# Altium schematic symbol library Relay.SchLib: 49 symbols
Pins are listed as number, name and electrical type; pins without a type are passive.

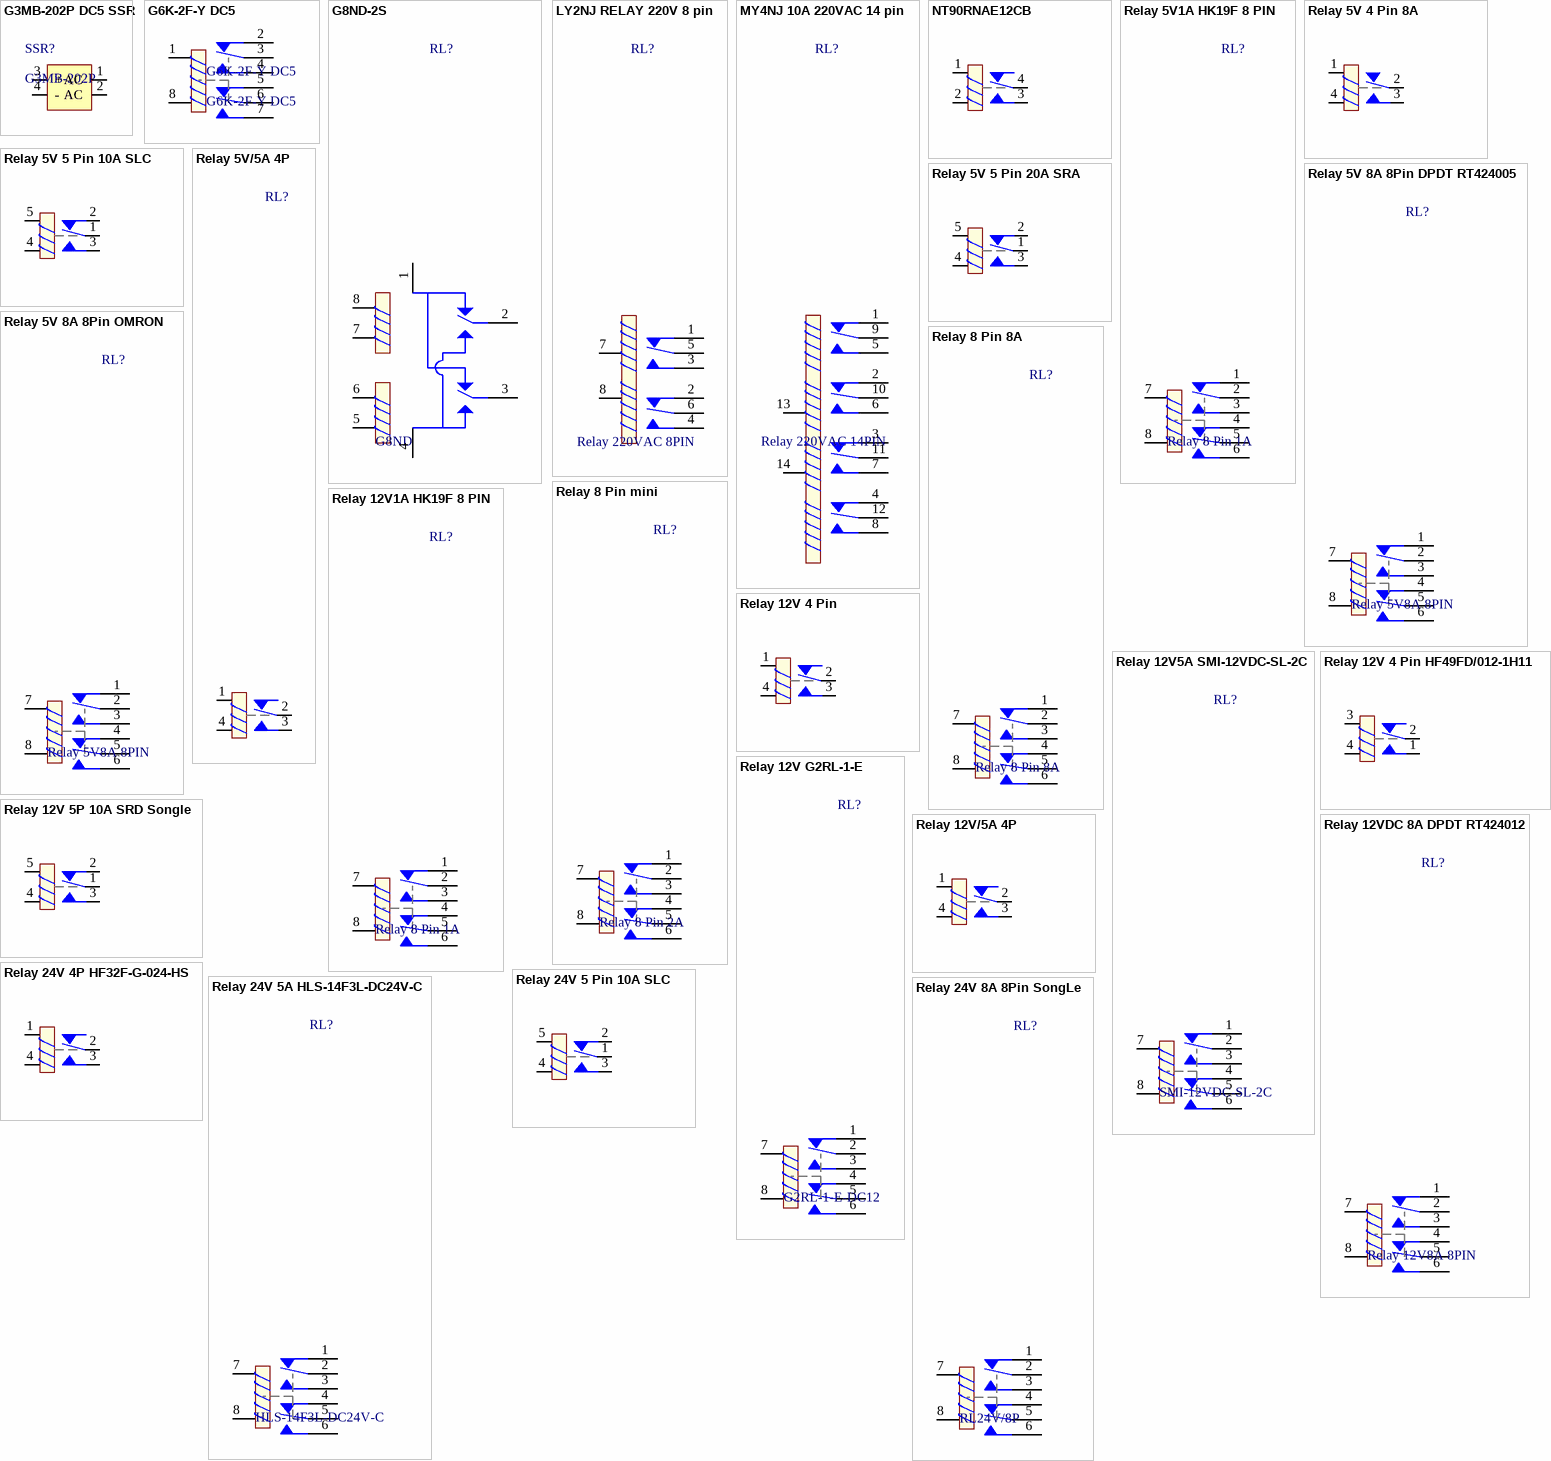
[diagram p0: symbols G3MB-202P DC5 SSR to Relay 24V 8A 8Pin SongLe]

## G3MB-202P DC5 SSR
designator SSR?, comment G3MB-202P
2 A at 100 to 240 VAC,  5 VDC, Zero / cross; Designed by: Nhox; Code: N/A
footprint G3MB (24.5x20.5x5.5mm)
pins: 1 AC, 2 AC, 3 +, 4 -

## G6K-2F-Y DC5
designator G6K-2F-Y DC5
G6K-2F-Y DC5 Omron Relay 1A 5V 8 Pin
footprint G6K-2F-Y (G6K-2F-Y DC5 Omron Relay 1A 5V 8 PIN)
pins: 1, 2, 3, 4, 5, 6, 7, 8

## G8ND-2S
designator RL?, comment G8ND
Automotive PCB relay (Dual H-Bridge); Code: N/A
footprint G8ND-2S
pins: 1, 2, 3, 4, 5, 6, 7, 8

## LY2NJ RELAY 220V 8 pin
designator RL?, comment Relay 220VAC 8PIN
Code: 2409-020; Code_sub1: N/A
footprint 13F-2Z-A2
pins: 1, 2, 3, 4, 5, 6, 7 13, 8 14

## MY4NJ 10A 220VAC 14 pin
designator RL?, comment Relay 220VAC 14PIN
Code: 2409-023; Code_sub1: 4301-062
footprint PY14-02
pins: 1, 2, 3, 4, 5, 6, 7, 8, 9, 10, 11, 12, 13, 14

## NT90RNAE12CB
designator RL?, comment 12V/40A
Relay NT90 40A; Code: 2403-232
footprint Relay BIG 4 Pin
pins: 1, 2, 3, 4

## Relay 5V1A HK19F 8 PIN
designator RL?, comment Relay 8 Pin 1A
Relay 5V1A HK19F-DC05V-SHG 8 Pin; Code: 2401-017
footprint Relay 8PIN mini (Reley DPDT, 8 pin, 1A, W400mil, L800mil,H 300mil)
pins: 1, 2, 3, 4, 5, 6, 7, 8

## Relay 5V 4 Pin 8A
designator RL?, comment Relay 10A/5V
Relay SPDT,8 A - 5VDC 4 Pin; Code: 2401-002
footprint RELAY 4PIN
pins: 1, 2, 3, 4

## Relay 5V 5 Pin 10A SLC
designator RL?, comment Relay 10A/5V
Relay SPDT,10A - 5VDC 5 Pin SONGLE SLC; Code: 2401-001
footprint Relay 5 pin 10A (Relay SPDT, 5 pin, 10A,W 650mil, L 800mil, H 800mil)
pins: 1, 2, 3, 4, 5

## Relay 5V 5 Pin 20A SRA
designator RL?, comment Relay 20A/5V
Relay SPDT,20A - 5VDC 5 Pin SONGLE SRA; Code: 2401-001
footprint Relay 5 pin SRA AL (Relay SPDT, 5 pin, 10A,W 12.4mm, L 16mm, H 14.2mm)
pins: 1, 2, 3, 4, 5

## Relay 5V 8A 8Pin DPDT RT424005
designator RL?, comment Relay 5V8A 8PIN
Relay 5VDC 8A DPDT RT424005; Code: 2401-023
footprint Relay 8P RT424005 (Reley DPDT, 8 pin, 8A, W500mil, L1100mil,H 950mil)
pins: 1, 2, 3, 4, 5, 6, 7, 8

## Relay 5V 8A 8Pin OMRON
designator RL?, comment Relay 5V8A 8PIN
Relay 5VDC 8A; Designed: TranLuyen; Code: N/A; ComponentLink1Description: Datasheet; ComponentLink1URL: https://omronfs.omron.com/en_US/ecb/products/pdf/en-g2rl.pdf
footprint Relay 8pin OMRON (Reley DPDT, 8P)
pins: 1, 2, 3, 4, 5, 6, 7, 8

## Relay 5V/5A 4P
designator RL?, comment Relay 5V/5A  (value not drawn)
G5NB-1A-E-5VDC Relay 5VDC 5A SPST-NO; Code: 2401-004; Designed by: TranLuyen
footprint Relay G5NB-1A-E
pins: 1, 2, 3, 4

## Relay 8 Pin 8A
designator RL?
Relay DPDT; Discription: Relay DPDT 5V, 12V - 1A - 5A; Value: Relay - 5V - 1A
footprint Relay 8pin (Reley DPDT, 8 pin, 5A, W500mil, L1100mil,H 950mil)
pins: 1, 2, 3, 4, 5, 6, 7, 8

## Relay 8 Pin mini
designator RL?, comment Relay 8 Pin 2A
Relay HK19F 5V/12V; Discription: Relay DPDT 5V, 12V - 1A - 5A; Value: Relay - 5V - 1A
footprint Relay 8PIN mini (Reley DPDT, 8 pin, 1A, W400mil, L800mil,H 300mil)
pins: 1, 2, 3, 4, 5, 6, 7, 8

## Relay 12V1A HK19F 8 PIN
designator RL?, comment Relay 8 Pin 1A
Relay 12V1A HK19F-DC12V-SHG 8 Pin; Code: 2403-210
footprint Relay 8PIN mini (Reley DPDT, 8 pin, 1A, W400mil, L800mil,H 300mil)
pins: 1, 2, 3, 4, 5, 6, 7, 8

## Relay 12V5A SMI-12VDC-SL-2C
designator RL?, comment SMI-12VDC-SL-2C
Code: 2403-135
footprint Relay 8pin OMRON (Reley DPDT, 8P 12.7*15.7*29)
pins: 1, 2, 3, 4, 5, 6, 7, 8

## Relay 12V 4 Pin
designator RL?, comment Relay 10A/12V
Relay SPDT JZC-32F/012-HS3; Code: 2403-011
footprint RELAY 4PIN
pins: 1, 2, 3, 4

## Relay 12V 4 Pin HF49FD/012-1H11
designator RL?, comment Relay 5A/12V
Relay SPDT HF49FD/012-1H11; Code: 2403-028
footprint Relay 12V5A HF49FD/012-1H11 (12x20x5mm)
footprint Relay 12V5A HF49FD/012-1H11_2_FD (12x20x5mm)
pins: 1, 2, 3, 4

## Relay 12V 5P 10A SRD Songle
designator RL?, comment Relay 10A/12V
Relay SPDT,10A - 12VDC 5 Pin SONGLE SRD; Code: 2403-017
footprint Relay SONGLE SRD 12V (Relay SPDT, 5 pin, 10A,W 650mil, L 800mil, H 800mil)
pins: 1, 2, 3, 4, 5

## Relay 12V G2RL-1-E
designator RL?, comment G2RL-1-E-DC12
G2RL PCB Power Relay; Code: 2403-225; ComponentLink1Description: Datasheet; ComponentLink1URL: https://omronfs.omron.com/en_US/ecb/products/pdf/en-g2rl.pdf
footprint Relay 8pin OMRON (Reley DPDT, 8P 12.7*15.7*29)
pins: 1, 2, 3, 4, 5, 6, 7, 8

## Relay 12V/5A 4P
designator RL?, comment Relay 12V/5A
G5NB-1A-E-12VDC, 5A SPST-NO; Code: 2403-012; Designed by: TranLuyen
footprint Relay G5NB-1A-E
pins: 1, 2, 3, 4

## Relay 12VDC 8A DPDT RT424012
designator RL?, comment Relay 12V8A 8PIN
Relay 12VDC 8A DPDT RT424012; Code: 2403-211
footprint Relay 8P RT424005 (Reley DPDT, 8 pin, 8A, W500mil, L1100mil,H 950mil)
pins: 1, 2, 3, 4, 5, 6, 7, 8

## Relay 24V 4P HF32F-G-024-HS
designator RL?, comment HF32F-G-024
Relay SPDT HF32F-G 10A; Code: 2404-009; Designed by: TranLuyen
footprint RELAY 4PIN - black
pins: 1, 2, 3, 4

## Relay 24V 5 Pin 10A SLC
designator RL?, comment Relay 10A/24V
Relay SPDT,10A - 24VDC 5 Pin SONGLE SLC; Code: 2404-012
footprint Relay 5 pin 10A (Relay SPDT, 5 pin, 10A,W 650mil, L 800mil, H 800mil)
pins: 1, 2, 3, 4, 5

## Relay 24V 5A HLS-14F3L-DC24V-C
designator RL?, comment HLS-14F3L-DC24V-C
Relay 24V 5A HLS-14F3L-DC24V-C; Code: N/A
footprint HLS-14F3L-DC24V-C
pins: 1, 2, 3, 4, 5, 6, 7, 8

## Relay 24V 8A 8Pin SongLe
designator RL?, comment RL24V/8P
Relay 8P; Designed: TranLuyen; Code: N/A
footprint Relay 8pin OMRON (Reley DPDT, 8P)
pins: 1, 2, 3, 4, 5, 6, 7, 8

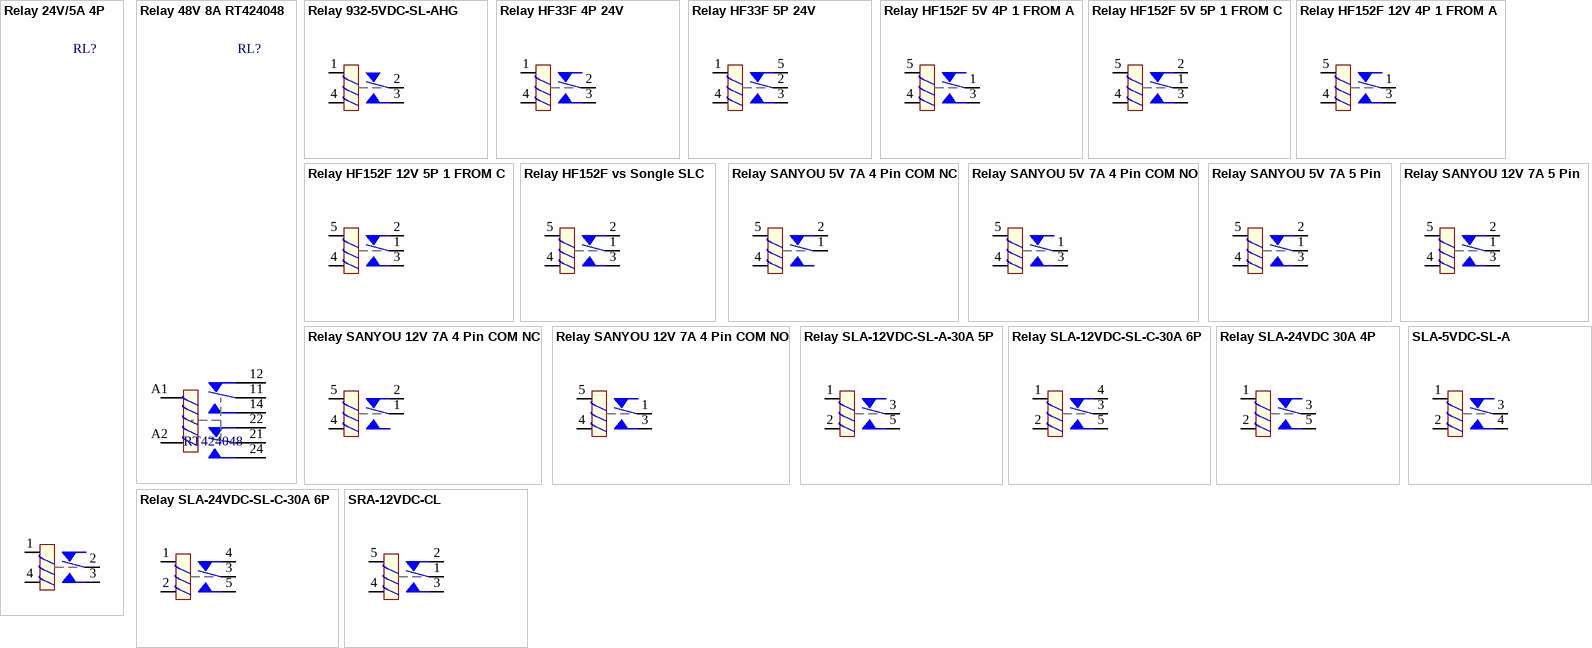
[diagram p1: symbols Relay 24V/5A 4P to SRA-12VDC-CL]

## Relay 24V/5A 4P
designator RL?, comment Relay 24V/5A  (value not drawn)
G5NB-1A-E-24VDC Relay  24VDC 5A SPST-NO; Designed by: TranLuyen; Code: N/A
footprint Relay G5NB-1A-E
pins: 1, 2, 3, 4

## Relay 48V 8A RT424048
designator RL?, comment RT424048
Relay 48V 8A RT424048; Code: N/A
footprint Relay RT2
pins: 11, 12, 14, 21, 22, 24, A1, A2

## Relay 932-5VDC-SL-AHG
designator RL?, comment RL-5V/16A
Relay NHC HUILONGCANG 932 Series; Designed by: TranLuyen; Code: N/A; ComponentLink1Description: Datasheets; ComponentLink1URL: https://github.com/TranLuyen-dev/Datasheets/blob/7f56fa0321b63c60dea403a14b0107a2237805bf/Relay/932-5VDC-SL-AHG_C396980.pdf
footprint RELAY 4PIN - black
pins: 1, 2, 3, 4

## Relay HF33F 4P 24V
designator RL?, comment Relay 10A/24V
Relay HONGFA 33F 24VDC; Code: 2404-164
footprint RELAY HF33F 4pin
pins: 1, 2, 3, 4

## Relay HF33F 5P 24V
designator RL?, comment Relay 10A/24V
Relay HONGFA 33F 24VDC; Code: 2404-164
footprint RELAY HF33F 5pin
pins: 1, 2, 3, 4, 5

## Relay HF152F 5V 4P 1 FROM A
designator RL?, comment Relay 20A/5V
Relay HF152F 5V 4P FROM A; Code: 2401-025-2; ComponentLink1Description: Datasheet; ComponentLink1URL: https://panda-bg.com/datasheet/2796-270716-Relay-HF152F.pdf
footprint Relay HF152F-1 Form A 4P (Relay HF152F-T W16 L21 H20.6)
pins: 1, 3, 4, 5

## Relay HF152F 5V 5P 1 FROM C
designator RL?, comment Relay 20A/5V
Relay HF152F 5V 4P FROM C; Code: 2401-025; ComponentLink1Description: Datasheet; ComponentLink1URL: https://panda-bg.com/datasheet/2796-270716-Relay-HF152F.pdf
footprint Relay HF152F-1 Form C 5P (Relay HF152F-T W16 L21 H20.6)
pins: 1, 2, 3, 4, 5

## Relay HF152F 12V 4P 1 FROM A
designator RL?, comment Relay 20A/12V
Relay HF152F 12V 4P FROM A; Code: 2403-219; ComponentLink1Description: Datasheet; ComponentLink1URL: https://panda-bg.com/datasheet/2796-270716-Relay-HF152F.pdf
footprint Relay HF152F-1 Form A 4P (Relay HF152F-T W16 L21 H20.6)
pins: 1, 3, 4, 5

## Relay HF152F 12V 5P 1 FROM C
designator RL?, comment Relay 20A/12V
Relay HF152F 12V 5P FROM C; Code: 2403-218; ComponentLink1Description: Datasheet; ComponentLink1URL: https://panda-bg.com/datasheet/2796-270716-Relay-HF152F.pdf
footprint Relay HF152F-1 Form C 5P (Relay HF152F-T W16 L21 H20.6)
pins: 1, 2, 3, 4, 5

## Relay HF152F vs Songle SLC
designator RL?, comment Relay 5V 5P
Relay HF152F 5V 5P vs Relay Songle 5V 5P SLC; Designed by: TranLuyen; Code: N/A
footprint Relay HF152F vs Songle SLC (Relay HF152F-T W16 L21 H20.6)
pins: 1, 2, 3, 4, 5

## Relay SANYOU 5V 7A 4 Pin COM NC
designator RL?, comment Relay 7A/5V
Relay SANYOU 5V 7A 1B; Code: N/A
footprint Relay Sanyou 4P 1B (SANYOU 4 Pin 1B)
pins: 1, 2, 4, 5

## Relay SANYOU 5V 7A 4 Pin COM NO
designator RL?, comment Relay 7A/5V
Relay SANYOU 5V 7A 1A; Code: 2401-030-1
footprint Relay Sanyou 4P 1A (SANYOU 4 Pin 1A)
pins: 1, 3, 4, 5

## Relay SANYOU 5V 7A 5 Pin
designator RL?, comment Relay 7A/5V
Relay SANYOU 5V 7A 1C; Code: 2401-030
footprint Relay Sanyou 5P 1C (SANYOU 5 Pin 1C)
pins: 1, 2, 3, 4, 5

## Relay SANYOU 12V 7A 4 Pin COM NC
designator RL?, comment Relay 7A/12V
Relay SANYOU 12V 7A 1B; Code: N/A
footprint Relay Sanyou 4P 1B (SANYOU 4 Pin 1B)
pins: 1, 2, 4, 5

## Relay SANYOU 12V 7A 4 Pin COM NO
designator RL?, comment Relay 7A/12V
Relay SANYOU 12V 7A 1A; Code: 2403-226-1
footprint Relay Sanyou 4P 1A (SANYOU 4 Pin 1A)
pins: 1, 3, 4, 5

## Relay SANYOU 12V 7A 5 Pin
designator RL?, comment Relay 7A/12V
Relay SANYOU 12V 7A 1C; Code: 2403-226
footprint Relay Sanyou 5P 1C (SANYOU 5 Pin 1C)
pins: 1, 2, 3, 4, 5

## Relay SLA-12VDC-SL-A-30A 5P
designator RL?, comment 12V30A
Relay SLA-12VDC-SL-A-30A 5P; Code: 2403-209
footprint Relay 30A 5 Pin
pins: 1, 2, 3, 5

## Relay SLA-12VDC-SL-C-30A 6P
designator RL?, comment 12V30A
Relay SLA-12VDC-SL-C-30A 6P; Code: 2403-023
footprint RELAY-30A-6PIN
pins: 1, 2, 3, 4, 5

## Relay SLA-24VDC 30A 4P
designator RL?, comment 24V30A
Relay SLA 30A 5P; Code: 2401-022
footprint Relay 30A 5 Pin
pins: 1, 2, 3, 5

## Relay SLA-24VDC-SL-C-30A 6P
designator RL?, comment 24V30A
Relay 30A 6P; Code: 2404-008
footprint RELAY-30A-6PIN
pins: 1, 2, 3, 4, 5

## SLA-5VDC-SL-A
designator RL?, comment Relay 30A
Big relay 30A 4 Pin, SLA-5VDC-SL-A; Code: N/A
footprint Relay 30A 4 Pin
pins: 1, 2, 3, 4

## SRA-12VDC-CL
designator RL?, comment Relay 20A/12V
Relay SPDT,20A - 12VDC 5 Pin; Code: N/A
footprint SRA-12VDC-CL (Relay SPDT, 5 pin, 10A,W 650mil, L 800mil, H 800mil)
pins: 1, 2, 3, 4, 5